# Altium schematic symbol library Diode%.SchLib: 376 symbols (part 3 of 9)
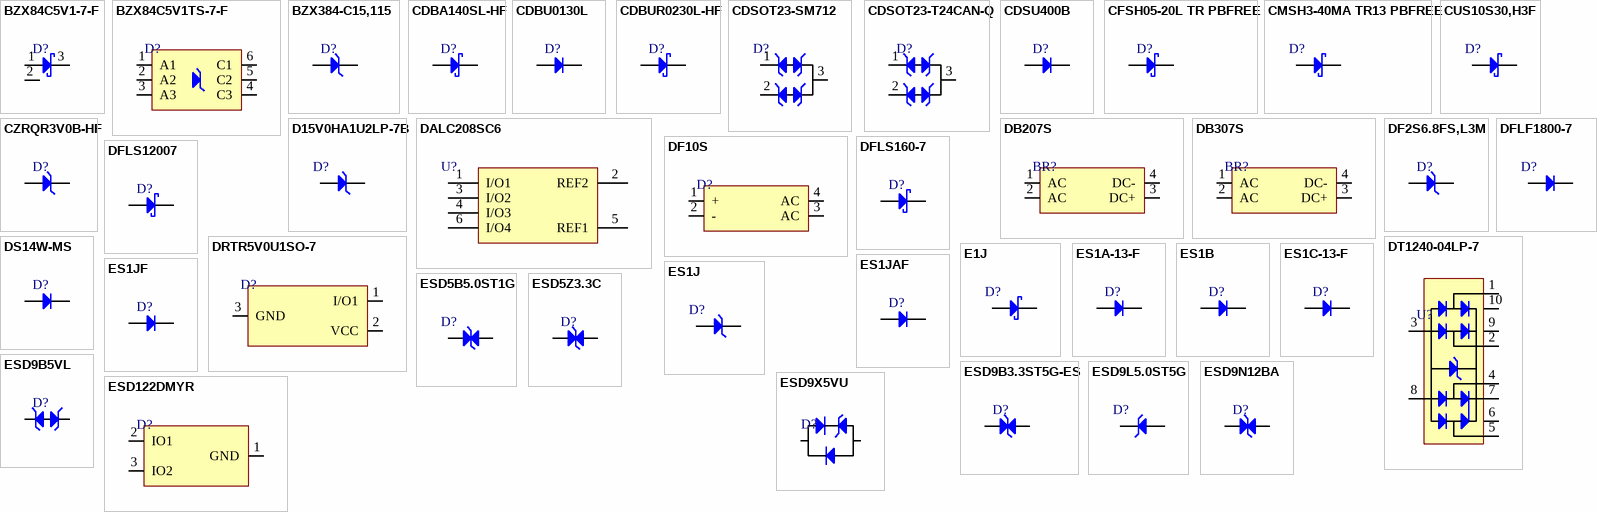
[diagram p11: symbols BZX84C5V1-7-F to ESD122DMYR]

## CDSOT23-T24CAN-Q
designator D?
TVS DIODE 24VWM 40VC SOT23-3; Manufacturer: Bourns; Manufacturer Part Number: CDSOT23-T24CAN-Q; Item Type: TVS Diodes; Supplier: Digikey; LCSC Part Number: C350941; RoHS: Yes; Stock: 17231; Pricing: 1=0.36, 10=0.282, 100=0.1691, 500=0.15656, 1000=0.10645, 3000=0.098, 6000=0.09393, 9000=0.08454, 30000=0.08328, 75000=0.07827 (USD); RoHS Compliant: 5897YesNo; ComponentLink1URL: http://www.farnell.com/datasheets/2372435.pdf?src-supplier=Farnell; ComponentLink1Description: http://www.farnell.com/datasheets/2372435.pdf?src-supplier=Farnell; ComponentLink2URL: https://www.bourns.com/docs/Product-Datasheets/cdsot23-t24can-Q.pdf?src-supplier=Digikey; ComponentLink2Description: https://www.bourns.com/docs/Product-Datasheets/cdsot23-t24can-Q.pdf?src-supplier=Digikey; ComponentLink3URL: http://www.farnell.com/datasheets/2372435.pdf?src-supplier=Newark; ComponentLink3Description: http://www.farnell.com/datasheets/2372435.pdf?src-supplier=Newark
footprint SOT-23 (TRANS NPN 40V 0.6A SOT23)
pins: 1, 2, 3

## CDSU400B
designator D?
DIODE STANDARD 80V 100MA 0603; Manufacturer: Comchip; Manufacturer Part Number: CDSU400B; Supplier: Digikey; LCSC Part Number: C2886041; RoHS: Yes; Item Type: Diode; Stock: 728591; Pricing: 1=0.13, 10=0.088, 100=0.054, 500=0.04476, 1000=0.04276, 2000=0.04223 (USD); ComponentLink1URL: https://datasheet.ciiva.com/4435/cdsu400b-revb370614-56727-4435278.pdf?src-supplier=Mouser; ComponentLink1Description: https://datasheet.ciiva.com/4435/cdsu400b-revb370614-56727-4435278.pdf?src-supplier=Mouser; ComponentLink2URL: https://datasheet.ciiva.com/911/cdsu400b-revb370614-911825.pdf?src-supplier=Digikey; ComponentLink2Description: https://datasheet.ciiva.com/911/cdsu400b-revb370614-911825.pdf?src-supplier=Digikey; ComponentLink3URL: https://datasheet.ciiva.com/911/cdsu400b-revb370614-911826.pdf?src-supplier=Digikey; ComponentLink3Description: https://datasheet.ciiva.com/911/cdsu400b-revb370614-911826.pdf?src-supplier=Digikey; ComponentLink4URL: https://datasheet.ciiva.com/911/cdsu400b-revb370614-911827.pdf?src-supplier=Digikey; ComponentLink4Description: https://datasheet.ciiva.com/911/cdsu400b-revb370614-911827.pdf?src-supplier=Digikey
footprint CDSU400B
pins: 1 A, 2 K

## CFSH05-20L TR PBFREE
designator D?
DIODE SCHOTTKY 20V 500MA SOD882; Manufacturer: Central Semiconductor; Manufacturer Part Number: CFSH05-20L TR PBFREE; Supplier: Digikey; Supplier Part Number: 1514-CFSH05-20LTRPBFREECT-ND; RoHS: Yes; Item Type: Diode; Pricing: 1=0.47, 10=0.374, 100=0.255, 500=0.17844, 1000=0.15369, 2000=0.14408 (USD); Mounting Technology: Surface Mount; Series: -; Average Rectified Current: 500mA; Max Reverse Voltage (DC): 20V; RoHS Compliant: Yes
footprint SOD-882
pins: 1 A, 2 K

## CMSH3-40MA TR13 PBFREE
designator D?
DIODE SCHOTTKY 40V 3A SMA; Manufacturer: Central Semiconductor; Manufacturer Part Number: CMSH3-40MA TR13 PBFREE; Supplier 1: Digi-Key; Stock 1: 27620; Pricing 1: 1=0.67, 10=0.592, 100=0.4536, 500=0.3586, 1000=0.28688, 2000=0.25999 (USD); RoHS Compliant: Yes; Supplier Part Number 1: 1514-CMSH3-40MATR13PBFREEDKR-ND
footprint SMA
pins: 1 K, 2 A

## CUS10S30,H3F
designator D?
Diode Schottky 30V 1A Surface Mount USC; Manufacturer: Toshiba; Manufacturer Part Number: CUS10S30,H3F; Max Reverse Current: 500uA; Peak Non-Repetitive Surge Current: 5A; Element Configuration: Single; Supplier 1: Avnet; RoHS: Yes; Category: Rectifier Diodes; Stock 1: 9000; Pricing 1: 3000=0.04896, 6000=0.04768, 12000=0.04544, 18000=0.04416, 24000=0.04320, 30000=0.04192, 300000=0.04096 (USD); Mount: Surface Mount; Case/Package: SOD; Number of Pins: 2; Contact Plating: Tin,Silver; Min Operating Temperature: -55°C; Max Operating Temperature: 125°C; Packaging: Cut Tape; Average Rectified Current: 1A; Max Reverse Voltage (DC): 30V; RoHS Compliant: No; ComponentLink1URL: https://toshiba.semicon-storage.com/info/docget.jsp?did=14077&prodName=CUS10S30&src-supplier=Digi-Key; ComponentLink1Description: https://toshiba.semicon-storage.com/info/docget.jsp?did=14077&prodName=CUS10S30&src-supplier=Digi-Key; ComponentLink2URL: http://toshiba.semicon-storage.com/info/docget.jsp?did=14077&prodName=CUS10S30&src-supplier=Avnet; ComponentLink2Description: http://toshiba.semicon-storage.com/info/docget.jsp?did=14077&prodName=CUS10S30&src-supplier=Avnet; ComponentLink3URL: http://toshiba.semicon-storage.com/info/lookup.jsp?pid=CUS10S30&amp;lang=en&src-supplier=Mouser; ComponentLink3Description: http://toshiba.semicon-storage.com/info/lookup.jsp?pid=CUS10S30&amp;lang=en&src-supplier=Mouser; Supplier Part Number 1: CUS10S30,H3F; LCSC Part Number: C146335
footprint SOD-323
pins: 1 K, 2 A

## CZRQR3V0B-HF
designator D?
DIODE ZENER 3V 125MW SOD923F; Manufacturer: Comchip; Manufacturer Part Number: CZRQR3V0B-HF; Item Type: Diodes; Tolerance: 2%; Impedance: 95R; Supplier: Digikey; RoHS: Yes; Stock: 15601; Pricing: 1=0.33 (USD); Mounting Technology: Surface Mount; Case/Package: 0402; Min Operating Temperature: -55°C; Max Operating Temperature: 125°C; Package Quantity: 5000; Packaging: Tape and Reel; Zener Voltage: 3V; Max Power Dissipation: 125mW; RoHS Compliant: Yes; ComponentLink1URL: https://datasheet.ciiva.com/2957/czrqr2v4b-hf-thru-czrqr39vb-hf-reva-2957735.pdf?src-supplier=Digikey; ComponentLink1Description: https://datasheet.ciiva.com/2957/czrqr2v4b-hf-thru-czrqr39vb-hf-reva-2957735.pdf?src-supplier=Digikey
footprint SOD-923F
pins: 1 A, 2 K

## D15V0HA1U2LP-7B
designator D?
TVS DIODE 15VWM 23VC DFN1006-2; Manufacturer: Diodes; Manufacturer Part Number: D15V0HA1U2LP-7B; Item Type: TVS Diodes; Supplier: Digikey; LCSC Part Number: C3702027; RoHS: Yes; Stock: 12938; Pricing: 1=0.3, 10=0.243, 25=0.2036, 100=0.129, 250=0.09956, 500=0.08484, 1000=0.05769, 2500=0.05204, 5000=0.04525 (USD)
footprint DFN1006-2L_
pins: 1 K, 2 A

## DALC208SC6
designator U?
TVS DIODE 5V SOT23-6; Manufacturer Part Number: DALC208SC6; Manufacturer: STMicroelectronics; Footprint: SOT-23-6; LCSC Part Number: C5123934; ComponentLink1Description: LCSC; ComponentLink1URL: https://www.lcsc.com/product-detail/MOSFETs_TECH-PUBLIC-DALC208SC6_C5123934.html
footprint SOT-23-6
pins: 1 I/O1, 2 REF2, 3 I/O2, 4 I/O3, 5 REF1, 6 I/O4

## DB207S
designator BR?
60A 1.1V@2A 2A 1kV DBS Bridge Rectifiers ROHS; Manufacturer: MDD; Manufacturer Part Number: DB207S; Package: DBS; LCSC Part Number: C29174; Item Type: Bridge Rectifier; ComponentLink1Description: LCSC; ComponentLink1URL: https://www.lcsc.com/product-detail/Bridge-Rectifiers_MDD-Microdiode-Electronics-DB207S_C29174.html
footprint DBS
pins: 1 AC, 2 AC, 3 DC+, 4 DC-

## DB307S
designator BR?
60A 1.1V@3A 3A 1kV DBS Bridge Rectifiers ROHS; Manufacturer: GOODWORK; Manufacturer Part Number: DB307S; Package: DBS; LCSC Part Number: C525744; Item Type: Bridge Rectifiers; ComponentLink1Description: LCSC; ComponentLink1URL: https://lcsc.com/product-detail/Bridge-Rectifiers_GOODWORK-DB307S_C525744.html?s_z=n_LMB8S-TP
footprint DBS
pins: 1 AC, 2 AC, 3 DC+, 4 DC-

## DF2S6.8FS,L3M
designator D?
TVS DIODE 5VWM 9VC SOD923; Manufacturer: Toshiba; Manufacturer Part Number: DF2S6.8FS,L3M; Item Type: TVS Diodes; Number of Unidirectional Channels: 1; Reverse Standoff Voltage: 5V; Min Breakdown Voltage: 6.4V; Power Line Protection: No; Peak Pulse Current: 1A; Diode Type: ZENER; Supplier: Digikey; LCSC Part Number: C1972978; RoHS: No; Stock: 487248; Pricing: 1=0.1, 10=0.068, 100=0.031, 500=0.0275, 1000=0.024, 2000=0.022, 5000=0.02 (USD); Mounting Technology: Surface Mount; Packaging: Cut Tape; Series: -; RoHS Compliant: No; ComponentLink1URL: http://www.mouser.com/ds/2/408/DF2S6.8FS_datasheet_en_20140709-708755.pdf?src-supplier=Mouser; ComponentLink1Description: http://www.mouser.com/ds/2/408/DF2S6.8FS_datasheet_en_20140709-708755.pdf?src-supplier=Mouser; ComponentLink2URL: https://toshiba.semicon-storage.com/info/docget.jsp?did=22219&prodName=DF2S6.8FS&src-supplier=Digikey; ComponentLink2Description: https://toshiba.semicon-storage.com/info/docget.jsp?did=22219&prodName=DF2S6.8FS&src-supplier=Digikey
footprint SOD-923.
pins: 1 K, 2 A

## DF10S
designator D?
50A 1.1V@1A 1A 1kV DBS Bridge Rectifiers ROHS; Manufacturer: MSKSEMI; Manufacturer Part Number: DF10S; Package: DBS; LCSC Part Number: C5174636; Item Type: Bridge Rectifier; ComponentLink1Description: LCSC; ComponentLink1URL: https://www.lcsc.com/product-detail/Bridge-Rectifiers_MSKSEMI-DF10S_C5174636.html
footprint DF10S
pins: 1 +, 2 -, 3 AC, 4 AC

## DFLF1800-7
designator D?
1.35V@1A 500ns 1A 800V Power-DI-123 Fast recovery/high efficiency diode ROHS; Manufacturer: Diodes Incorporated; Manufacturer Part number: DFLF1800-7; Package: Power-DI-123; LCSC Part Number: C460678; Item Type: Diode; ComponentLink1Description: LCSC; ComponentLink1URL: https://www.lcsc.com/product-detail/Fast-recovery-high-efficiency-diode_Diodes-Incorporated-DFLF1800-7_C460678.html
footprint PowerDI123
pins: 1 A, 2 K

## DFLS160-7
designator D?
DIODE SCHOTTKY 60V 1A PWRDI123; Manufacturer: Diodes; Manufacturer Part Number: DFLS160-7; Max Reverse Current: 100uA; Peak Non-Repetitive Surge Current: 50A; Forward Voltage: 500mV; Polarity: Standard; Value: 67pF; Supplier: Future Electronics; Supplier Part Number: 3129421; RoHS: Yes; Category: Rectifier Diodes; Stock: 33000; Pricing: 3000=0.103, 6000=0.1, 9000=0.0986, 12000=0.0975, 15000=0.0941 (USD); Mounting Technology: Surface Mount; Pins: 2; Min Operating Temperature: -65°C; Max Operating Temperature: 150°C; Forward Current: 1A; Max Repetitive Reverse Voltage (Vrrm): 60V; Packaging: Tape and Reel; Package Quantity: 3000; Average Rectified Current: 1A; Max Forward Surge Current (Ifsm): 50A; Termination: SMD/SMT; Voltage Rating (DC): 60V; Current Rating: 1A; Output Current: 1A; Max Reverse Voltage (DC): 60V; Series: -; Length: 2.8mm; Width: 1.78mm; Height: 0.98mm; Radiation Hardening: No; Reach SVHC Compliant: No; Lead Free: Lead Free; RoHS Compliant: Yes; ComponentLink1URL: https://datasheet.ciiva.com/8301/ds30548-8301937.pdf?src-supplier=Avnet; ComponentLink1Description: https://datasheet.ciiva.com/8301/ds30548-8301937.pdf?src-supplier=Avnet; ComponentLink2URL: https://datasheet.ciiva.com/4715/ds30548-86621-4715693.pdf?src-supplier=Mouser; ComponentLink2Description: https://datasheet.ciiva.com/4715/ds30548-86621-4715693.pdf?src-supplier=Mouser; ComponentLink3URL: https://datasheet.ciiva.com/16958/0900766b80e30da9-16958716.pdf?src-supplier=Allied+Electronics; ComponentLink3Description: https://datasheet.ciiva.com/16958/0900766b80e30da9-16958716.pdf?src-supplier=Allied+Electronics; ComponentLink4URL: https://datasheet.ciiva.com/22695/ds30548-22695808.pdf?src-supplier=Element14; ComponentLink4Description: https://datasheet.ciiva.com/22695/ds30548-22695808.pdf?src-supplier=Element14; ComponentLink5URL: https://datasheet.ciiva.com/16199/ds30548-16199750.pdf?src-supplier=Future+Electronics; ComponentLink5Description: https://datasheet.ciiva.com/16199/ds30548-16199750.pdf?src-supplier=Future+Electronics; ComponentLink6URL: https://datasheet.ciiva.com/914/ds30548-914331.pdf?src-supplier=Digikey; ComponentLink6Description: https://datasheet.ciiva.com/914/ds30548-914331.pdf?src-supplier=Digikey; ComponentLink7URL: https://datasheet.ciiva.com/914/ds30548-914332.pdf?src-supplier=Digikey; ComponentLink7Description: https://datasheet.ciiva.com/914/ds30548-914332.pdf?src-supplier=Digikey; ComponentLink8URL: https://datasheet.ciiva.com/914/ds30548-914333.pdf?src-supplier=Digikey; ComponentLink8Description: https://datasheet.ciiva.com/914/ds30548-914333.pdf?src-supplier=Digikey; ComponentLink9URL: https://datasheet.ciiva.com/7964/ds30548-7964253.pdf?src-supplier=Element14; ComponentLink9Description: https://datasheet.ciiva.com/7964/ds30548-7964253.pdf?src-supplier=Element14; Item Type: Diode
footprint PowerDI123
pins: 1 A, 2 K

## DFLS12007
designator D?
DIODE SCHOTTK 200V 1A POWERDI123; Manufacturer: Diodes; Manufacturer Part Number: DFLS12007; Forward Voltage: 850mV; Max Reverse Current: 2uA; Peak Non-Repetitive Surge Current: 40A; Element Configuration: Single; Polarity: Standard; Value: 23pF; Supplier: Arrow Electronics; LCSC Part Number: C324985; RoHS: Yes; Item Type: Diode; Stock: 93936; Pricing: 734=0.2416, 3000=0.2002, 6000=0.1958 (USD); Mounting Technology: Surface Mount; Pins: 123; Contact Plating: Tin,Matte; Weight: 1.058219oz; Min Operating Temperature: -65°C; Max Operating Temperature: 150°C; Packaging: Cut Tape; Forward Current: 1A; Package Quantity: 3000; Average Rectified Current: 1A; Max Repetitive Reverse Voltage (Vrrm): 200V; Max Forward Surge Current (Ifsm): 40A; Termination: SMD/SMT; Voltage Rating (DC): 200V; Current Rating: 1A; Output Current: 1A; Max Reverse Voltage (DC): 200V; Series: DFLS1200; Length: 2.8mm; Width: 1.78mm; Height: 0.98mm; Radiation Hardening: No; Reach SVHC Compliant: Yes; Lead Free: Lead Free; ComponentLink1URL: https://datasheet.ciiva.com/4715/ds30628-48014-4715817.pdf?src-supplier=Mouser; ComponentLink1Description: https://datasheet.ciiva.com/4715/ds30628-48014-4715817.pdf?src-supplier=Mouser; ComponentLink2URL: https://datasheet.ciiva.com/8301/ds30628-8301755.pdf?src-supplier=Avnet; ComponentLink2Description: https://datasheet.ciiva.com/8301/ds30628-8301755.pdf?src-supplier=Avnet; ComponentLink3URL: https://datasheet.ciiva.com/16564/ds30628-16564006.pdf?; ComponentLink3Description: https://datasheet.ciiva.com/16564/ds30628-16564006.pdf?; ComponentLink4URL: https://datasheet.ciiva.com/914/ds30628-914669.pdf?src-supplier=Digikey; ComponentLink4Description: https://datasheet.ciiva.com/914/ds30628-914669.pdf?src-supplier=Digikey; ComponentLink5URL: https://datasheet.ciiva.com/914/ds30628-914670.pdf?src-supplier=Digikey; ComponentLink5Description: https://datasheet.ciiva.com/914/ds30628-914670.pdf?src-supplier=Digikey; ComponentLink6URL: https://datasheet.ciiva.com/914/ds30628-914671.pdf?src-supplier=Digikey; ComponentLink6Description: https://datasheet.ciiva.com/914/ds30628-914671.pdf?src-supplier=Digikey; ComponentLink7URL: https://datasheet.ciiva.com/22695/378369-22695804.pdf?src-supplier=Element14; ComponentLink7Description: https://datasheet.ciiva.com/22695/378369-22695804.pdf?src-supplier=Element14
footprint PowerDI123
pins: 1 A, 2 K

## DRTR5V0U1SO-7
designator D?
TVS DIODE 5.5VWM SOT23; Manufacturer: Diodes; Manufacturer Part Number: DRTR5V0U1SO-7; Item Type: (TVS/ESD); Supplier: Digikey; Supplier Part Number: DRTR5V0U1SO-7DICT-ND; RoHS: Yes; Category: TVS Diodes; Stock: 83982; Pricing: 1=0.34, 10=0.238, 100=0.1201, 500=0.098, 1000=0.07271 (USD); ComponentLink1URL: http://www.farnell.com/datasheets/2814436.pdf?src-supplier=Farnell; ComponentLink1Description: http://www.farnell.com/datasheets/2814436.pdf?src-supplier=Farnell; ComponentLink2URL: http://www.mouser.com/ds/2/115/DRTR5V0U1SO-271637.pdf?src-supplier=Mouser; ComponentLink2Description: http://www.mouser.com/ds/2/115/DRTR5V0U1SO-271637.pdf?src-supplier=Mouser; ComponentLink3URL: http://www.diodes.com/datasheets/DRTR5V0U1SO.pdf?src-supplier=Avnet; ComponentLink3Description: http://www.diodes.com/datasheets/DRTR5V0U1SO.pdf?src-supplier=Avnet; LCSC Part Number: C1973123
footprint SOT-23 (TRANS NPN 40V 0.6A SOT23)
pins: 1 I/O1, 2 VCC, 3 GND

## DS14W-MS
designator D?
Independent Type 1A 40V 550mV@1A SOD-123FL Diodes - General Purpose ROHS; Manufacturer: MSKSEMI; Manufacturer Part Number: DS14W-MS; Item Type: Diode; Package: SOD-123FL; LCSC Part Number: C5120758; ComponentLink1Description: LCSC; ComponentLink1URL: https://www.lcsc.com/product-detail/Diodes-General-Purpose_MSKSEMI-DS14W-MS_C5120758.html
footprint SOD-123FL
pins: 1 K, 2 A

## DT1240-04LP-7
designator U?
TVS DIODE 5.5VWM 11VC U-DFN2510; Manufacturer: Diodes; Manufacturer Part Number: DT1240-04LP-7; Item Type: TVS Diodes; Supplier: Digi-Key; Supplier Part Number: DT1240-04LP-7DICT-ND; RoHS: Yes; Stock: 985; Pricing: 1=0.46, 10=0.319, 100=0.1612, 500=0.1315, 1000=0.09757 (USD); ComponentLink1URL: https://datasheet.ciiva.com/29574/dt1240-04lp-29574117.pdf?src-supplier=Digi-Key; ComponentLink1Description: https://datasheet.ciiva.com/29574/dt1240-04lp-29574117.pdf?src-supplier=Digi-Key; ComponentLink2URL: https://datasheet.ciiva.com/48480/dt1240-04lp-48480037.pdf?src-supplier=Avnet; ComponentLink2Description: https://datasheet.ciiva.com/48480/dt1240-04lp-48480037.pdf?src-supplier=Avnet; ComponentLink3URL: https://datasheet.ciiva.com/29574/dt1240-04lp-29574118.pdf?src-supplier=Digi-Key; ComponentLink3Description: https://datasheet.ciiva.com/29574/dt1240-04lp-29574118.pdf?src-supplier=Digi-Key; ComponentLink4URL: https://datasheet.ciiva.com/29574/dt1240-04lp-29574119.pdf?src-supplier=Digi-Key; ComponentLink4Description: https://datasheet.ciiva.com/29574/dt1240-04lp-29574119.pdf?src-supplier=Digi-Key; LCSC Part Number: C444992
footprint U-DFN2510-10
pins: 1, 2, 3, 4, 5, 6, 7, 8, 9, 10

## E1J
designator D?
SOD-123FL Diodes - Fast Recovery Rectifiers ROHS; Manufacturer: XCH; Manufacturer Part Number: E1J; Item Type: Diode; Package: SOD-123FL; JLCPCB Part Number: C5354022; ComponentLink1Description: JLCPCB; ComponentLink1URL: https://jlcpcb.com/partdetail/Xch-E1J/C5354022
footprint SOD-123FL
pins: 1 K, 2 A

## ES1A-13-F
designator D?
DIODE GEN PURP 50V 1A SMA; Manufacturer: Diodes; Manufacturer Part Number: ES1A-13-F; Supplier: Digikey; LCSC Part Number: C674398; RoHS: Yes; Item Type: Diodes; Stock: 130862; Pricing: 1=0.47, 10=0.336, 100=0.1693, 500=0.15004, 1000=0.11676, 2000=0.1045 (USD); ComponentLink1URL: https://datasheet.ciiva.com/27052/1540279-27052395.pdf?src-supplier=Jameco; ComponentLink1Description: https://datasheet.ciiva.com/27052/1540279-27052395.pdf?src-supplier=Jameco; ComponentLink2URL: https://datasheet.ciiva.com/7964/ds14001-7964264.pdf?src-supplier=Element14; ComponentLink2Description: https://datasheet.ciiva.com/7964/ds14001-7964264.pdf?src-supplier=Element14; ComponentLink3URL: https://datasheet.ciiva.com/913/ds14001-913221.pdf?src-supplier=Digikey; ComponentLink3Description: https://datasheet.ciiva.com/913/ds14001-913221.pdf?src-supplier=Digikey; ComponentLink4URL: https://datasheet.ciiva.com/913/ds14001-913222.pdf?src-supplier=Digikey; ComponentLink4Description: https://datasheet.ciiva.com/913/ds14001-913222.pdf?src-supplier=Digikey; ComponentLink5URL: https://datasheet.ciiva.com/913/ds14001-913223.pdf?src-supplier=Digikey; ComponentLink5Description: https://datasheet.ciiva.com/913/ds14001-913223.pdf?src-supplier=Digikey; ComponentLink6URL: https://datasheet.ciiva.com/15144/getdatasheetpartid-89769-15144650.pdf?src-supplier=Verical; ComponentLink6Description: https://datasheet.ciiva.com/15144/getdatasheetpartid-89769-15144650.pdf?src-supplier=Verical
footprint SMA
pins: 1 K, 2 A

## ES1B
designator D?
DIODE STANDARD 100V 1A DO214AC; Manufacturer: ON Semiconductor / Fairchild; Manufacturer Part Number: ES1B; Item Type: Diodes; Supplier: Arrow Electronics; LCSC Part Number: C232818; RoHS: Yes; Stock: 142500; Pricing: 7500=0.0732, 22500=0.0629 (USD); ComponentLink1URL: https://datasheet.ciiva.com/13095/es1b-187537-13095611.pdf?src-supplier=Mouser; ComponentLink1Description: https://datasheet.ciiva.com/13095/es1b-187537-13095611.pdf?src-supplier=Mouser; ComponentLink2URL: https://datasheet.ciiva.com/918/es1a-918414.pdf?src-supplier=Digikey; ComponentLink2Description: https://datasheet.ciiva.com/918/es1a-918414.pdf?src-supplier=Digikey; ComponentLink3URL: https://datasheet.ciiva.com/918/es1a-918415.pdf?src-supplier=Digikey; ComponentLink3Description: https://datasheet.ciiva.com/918/es1a-918415.pdf?src-supplier=Digikey; ComponentLink4URL: https://datasheet.ciiva.com/918/es1a-918416.pdf?src-supplier=Digikey; ComponentLink4Description: https://datasheet.ciiva.com/918/es1a-918416.pdf?src-supplier=Digikey; ComponentLink5URL: https://datasheet.ciiva.com/28468/575529-28468958.pdf?src-supplier=Element14; ComponentLink5Description: https://datasheet.ciiva.com/28468/575529-28468958.pdf?src-supplier=Element14; ComponentLink6URL: https://datasheet.ciiva.com/7965/575529-7965132.pdf?src-supplier=Element14; ComponentLink6Description: https://datasheet.ciiva.com/7965/575529-7965132.pdf?src-supplier=Element14
footprint SMA(DO-214AC)
pins: 1 K, 2 A

## ES1C-13-F
designator D?
DIODE STANDARD 150V 1A SMA; Manufacturer: Diodes; Manufacturer Part Number: ES1C-13-F; Max Reverse Current: 5uA; Reverse Recovery Time: 25ns; Peak Non-Repetitive Surge Current: 30A; Forward Voltage: 920mV; Value: 10pF; Supplier: Arrow Electronics; LCSC Part Number: C781252; RoHS: Yes; Item Type: Diodes; Stock: 614; Pricing: 614=0.1548 (USD); Mounting Technology: Surface Mount; Case/Package: SMA; Pins: 2; Weight: 0.002258oz; Min Operating Temperature: -55°C; Max Operating Temperature: 150°C; Forward Current: 1A; Max Repetitive Reverse Voltage (Vrrm): 150V; Package Quantity: 5000; Packaging: Tape and Reel; Max Surge Current: 30A; Recovery Time: 25ns; Reverse Voltage (DC): 150V; Average Rectified Current: 1A; Termination: SMD/SMT; Polarity: Standard; Voltage Rating (DC): 150V; Current Rating: 1A; Output Current: 1A; Max Reverse Voltage (DC): 150V; Series: -; Reverse Recovery Time-Max: 25ns; Length: 4.6mm; Width: 2.92mm; Height: 2.1mm; Radiation Hardening: No; Lead Free: Lead Free; RoHS Compliant: Yes; ComponentLink1URL: https://datasheet.ciiva.com/914/ds14001-914688.pdf?src-supplier=Digikey; ComponentLink1Description: https://datasheet.ciiva.com/914/ds14001-914688.pdf?src-supplier=Digikey; ComponentLink2URL: https://datasheet.ciiva.com/8301/ds14001-8301646.pdf?src-supplier=Avnet; ComponentLink2Description: https://datasheet.ciiva.com/8301/ds14001-8301646.pdf?src-supplier=Avnet; ComponentLink3URL: https://datasheet.ciiva.com/914/ds14001-914689.pdf?src-supplier=Digikey; ComponentLink3Description: https://datasheet.ciiva.com/914/ds14001-914689.pdf?src-supplier=Digikey
footprint SMA
pins: 1 K, 2 A

## ES1J
designator D?
1.7V@1A 35ns Single 1A 600V SMA Diodes - Fast Recovery Rectifiers ROHS; Manufacturer: MDD; Manufacturer Part Number: ES1J; Item Type: Diode; Package: SMA; LCSC Part Number: C412438; ComponentLink1Description: LCSC; ComponentLink1URL: https://www.lcsc.com/product-detail/Diodes-Fast-Recovery-Rectifiers_MDD-Microdiode-Electronics-ES1J_C412438.html
footprint SMA
pins: 1 K, 2 A

## ES1JAF
designator D?
DIODE GEN PURP 600V 1A DO214AD; Manufacturer: ON Semiconductor / Fairchild; Manufacturer Part Number: ES1JAF; Value: 15pF; Max Reverse Current: 1uA; Supplier: Digikey; LCSC Part Number: C896698; RoHS: Yes; Item Type: Diode; Stock: 35994; Pricing: 1=0.66, 10=0.443, 100=0.3026, 500=0.23836, 1000=0.21716, 2000=0.19913, 5000=0.17939 (USD); Forward Current: 1A; Reverse Voltage: 600V; Height: 1.1mm; ComponentLink1URL: http://www.farnell.com/datasheets/2572314.pdf?src-supplier=Farnell; ComponentLink1Description: http://www.farnell.com/datasheets/2572314.pdf?src-supplier=Farnell; ComponentLink2URL: http://www.farnell.com/datasheets/2572314.pdf?src-supplier=Newark; ComponentLink2Description: http://www.farnell.com/datasheets/2572314.pdf?src-supplier=Newark; ComponentLink3URL: http://www.farnell.com/datasheets/2572314.pdf?src-supplier=Element14; ComponentLink3Description: http://www.farnell.com/datasheets/2572314.pdf?src-supplier=Element14; ComponentLink4URL: https://www.onsemi.com/pub/Collateral/ES1JAF-D.PDF?src-supplier=Digikey; ComponentLink4Description: https://www.onsemi.com/pub/Collateral/ES1JAF-D.PDF?src-supplier=Digikey; ComponentLink5URL: https://www.fairchildsemi.com/datasheets/ES/ES1DAF.pdf?src-supplier=Digikey; ComponentLink5Description: https://www.fairchildsemi.com/datasheets/ES/ES1DAF.pdf?src-supplier=Digikey
footprint DO-214AD (SMAF)
pins: 1 K, 2 A

## ES1JF
designator D?
1.65V@1A 35ns Independent Type 1A 600V DO-214AD Fast Recovery / High Efficiency Diodes ROHS; Manufacturer: Foshan Blue Rocket Elec; Manufacturer Part Number: ES1JF; Item Type: Diode; Package: DO-214AD; LCSC Part Number: C328590; ComponentLink1Description: LCSC; ComponentLink1URL: https://www.lcsc.com/product-detail/Fast-recovery-high-efficiency-diode_Foshan-Blue-Rocket-Elec-ES1JF_C328590.html
footprint DO-214AD
pins: 1 K, 2 A

## ESD5B5.0ST1G
designator D?
TVS DIODE 5VWM SOD523; Manufacturer: ON Semiconductor; Manufacturer Part Number: ESD5B5.0ST1G; Item Type: ESD Protection Device; Supplier: Future Electronics; Supplier Part Number: 1159725; RoHS: Yes; Category: ESD and Circuit Protection ICs; Stock: 486000; Pricing: 3000=0.0396, 9000=0.0381, 15000=0.0375, 60000=0.0357, 90000=0.0346 (USD); ComponentLink1URL: https://datasheet.ciiva.com/339/esd5b5-0st1g-339772.pdf?src-supplier=Avnet; ComponentLink1Description: https://datasheet.ciiva.com/339/esd5b5-0st1g-339772.pdf?src-supplier=Avnet; ComponentLink2URL: https://datasheet.ciiva.com/339/esd5b5-0st1g-339772.pdf?src-supplier=Digi-Key; ComponentLink2Description: https://datasheet.ciiva.com/339/esd5b5-0st1g-339772.pdf?src-supplier=Digi-Key; ComponentLink3URL: https://datasheet.ciiva.com/22637/716649-22637178.pdf?src-supplier=Element14; ComponentLink3Description: https://datasheet.ciiva.com/22637/716649-22637178.pdf?src-supplier=Element14; ComponentLink4URL: https://datasheet.ciiva.com/4510/esd5b5-0st1g-241623-4510548.pdf?src-supplier=Mouser; ComponentLink4Description: https://datasheet.ciiva.com/4510/esd5b5-0st1g-241623-4510548.pdf?src-supplier=Mouser; ComponentLink5URL: https://datasheet.ciiva.com/339/esd5b5-0st1-d-339773.pdf?src-supplier=Digi-Key; ComponentLink5Description: https://datasheet.ciiva.com/339/esd5b5-0st1-d-339773.pdf?src-supplier=Digi-Key; ComponentLink6URL: https://datasheet.ciiva.com/339/esd5b5-0st1-d-339774.pdf?src-supplier=Digi-Key; ComponentLink6Description: https://datasheet.ciiva.com/339/esd5b5-0st1-d-339774.pdf?src-supplier=Digi-Key; LCSC Part Number: C93623
footprint SOD-523 (Bi-Directional)
pins: 1 A, 2 A

## ESD5Z3.3C
designator D?
5A 60W 12V 3.6V 3.3V SOD-523 ESD and Surge Protection (TVS/ESD) ROHS; Manufacturer: MDD(Microdiode Semiconductor); Manufacturer Part Number: ESD5Z3.3C; Package: SOD-523; LCSC Part Number: C502551; Item Type: (TVS/ESD); ComponentLink1Description: LCSC; ComponentLink1URL: https://www.lcsc.com/product-detail/ESD-and-Surge-Protection-TVS-ESD_MDD-Microdiode-Semiconductor-ESD5Z3-3C_C502551.html
footprint SOD-523 (Bi-Directional)
pins: 1 A, 2 A

## ESD9B3.3ST5G-ES
designator D?
6A 80W 10V 3.7V Bidirectional 3.3V SOD-923 ESD and Surge Protection (TVS/ESD) ROHS; Manufacturer: ElecSuper; Manufacturer Part Number: ESD9B3.3ST5G-ES; Item Type: Diode; Package: SOD-923; LCSC Part Number: C5180230; ComponentLink1Description: LCSC; ComponentLink1URL: https://www.lcsc.com/product-detail/ESD-and-Surge-Protection-TVS-ESD_ElecSuper-ESD9B3-3ST5G-ES_C5180230.html?s_z=n_C5180230
footprint SOD-923.
pins: 1 A, 2 A

## ESD9B5VL
designator D?
3A 35W 12V 5.6V Bidirectional 5V DFN1006 ESD and Surge Protection (TVS/ESD) ROHS; Manufacturer: TECH PUBLIC; Manufacturer Part Number: ESD9B5VL; Package: DFN1006; LCSC Part Number: C2827544; Item Type: (TVS/ESD); ComponentLink1Description: LCSC; ComponentLink1URL: https://www.lcsc.com/product-detail/ESD-and-Surge-Protection-TVS-ESD_TECH-PUBLIC-ESD9B5VL_C2827544.html?s_z=n_ESD9B5VL
footprint DFN1006-2L (Bi-Directional)
pins: 1 K, 2 K

## ESD9L5.0ST5G
designator D?
TVS DIODE 5V 9.8V SOD923; Manufacturer: ON Semiconductor; Manufacturer Part Number: ESD9L5.0ST5G; Capacitance: 0.9pF; Direction: Unidirectional; Number of Unidirectional Channels: 1; Min Breakdown Voltage: 5.4V; Power Line Protection: No; Leakage Current: 1uA; Element Configuration: Single; Peak Pulse Current: 1A; Diode Type: ZENER; Reverse Breakdown Voltage: 5.8V; Peak Pulse Power: 150mW; ESD Protection: Yes; Test Current: 1mA; Supplier 1: Digi-Key; RoHS: Yes; Category: ESD and Circuit Protection ICs; Stock 1: 558996; Pricing 1: 1=0.37000, 10=0.25600, 100=0.12500, 500=0.10426, 1000=0.07244, 2000=0.06278 (USD); Case/Package: SOD-923-2; Number of Pins: 2; Contact Plating: Tin,Matte; Min Operating Temperature: -55°C; Max Operating Temperature: 150°C; Package Quantity: 1; Packaging: Tape and Reel; Clamping Voltage: 9.8V; Reverse Standoff Voltage: 5V; Working Voltage: 5V; Resistor Type: Zener; Series: Automotive, AEC-Q101; Number of Elements: 1; Operating Supply Voltage: 5V; Max Surge Current: 1A; Breakdown Voltage: 5.4V; Number of Channels: 1; Polarity: Unidirectional; Termination: SMD/SMT; Max Reverse Leakage Current: 1uA; Max Breakdown Voltage: 5.4V; Number of Lines: 1; Power Dissipation: 150mW; Clamping Voltage-Max: 9.8V; Length: 0.8mm; Width: 0.65mm; Height: 0.4mm; Depth: 0.6mm; Radiation Hardening: No; Lead Free: Lead Free; RoHS Compliant: Yes; REACH SVHC: No SVHC; Halogen Free: Halogen Free; ComponentLink1URL: https://datasheet.ciiva.com/15143/getdatasheetpartid-185186-15143896.pdf?src-supplier=Verical; ComponentLink1Description: https://datasheet.ciiva.com/15143/getdatasheetpartid-185186-15143896.pdf?src-supplier=Verical; ComponentLink2URL: https://datasheet.ciiva.com/4510/esd9l-d-4510647.pdf?src-supplier=Mouser; ComponentLink2Description: https://datasheet.ciiva.com/4510/esd9l-d-4510647.pdf?src-supplier=Mouser; ComponentLink3URL: https://datasheet.ciiva.com/3304/esd9l-d-3304011.pdf?src-supplier=Avnet; ComponentLink3Description: https://datasheet.ciiva.com/3304/esd9l-d-3304011.pdf?src-supplier=Avnet; ComponentLink4URL: https://datasheet.ciiva.com/16437/esd9l-d-16437835.pdf?src-supplier=Future+Electronics; ComponentLink4Description: https://datasheet.ciiva.com/16437/esd9l-d-16437835.pdf?src-supplier=Future+Electronics; ComponentLink5URL: https://datasheet.ciiva.com/339/esd9l-d-339853.pdf?src-supplier=Digi-Key; ComponentLink5Description: https://datasheet.ciiva.com/339/esd9l-d-339853.pdf?src-supplier=Digi-Key; ComponentLink6URL: https://datasheet.ciiva.com/339/esd9l-d-339854.pdf?src-supplier=Digi-Key; ComponentLink6Description: https://datasheet.ciiva.com/339/esd9l-d-339854.pdf?src-supplier=Digi-Key; ComponentLink7URL: https://datasheet.ciiva.com/11195/esd9l-d-11195342.pdf?src-supplier=Avnet; ComponentLink7Description: https://datasheet.ciiva.com/11195/esd9l-d-11195342.pdf?src-supplier=Avnet; ComponentLink8URL: https://datasheet.ciiva.com/25958/esd9l-d-25958446.pdf?src-supplier=Avnet+Europe; ComponentLink8Description: https://datasheet.ciiva.com/25958/esd9l-d-25958446.pdf?src-supplier=Avnet+Europe; ComponentLink9URL: https://datasheet.ciiva.com/339/esd9l-d-339855.pdf?src-supplier=Digi-Key; ComponentLink9Description: https://datasheet.ciiva.com/339/esd9l-d-339855.pdf?src-supplier=Digi-Key; Supplier Part Number 1: ESD9L5.0ST5GOSCT-ND; LCSC Part Number: C82326
footprint SOD-923.
pins: 1 K, 2 A

## ESD9N12BA
designator D?
X1-DFN1006-2 ESD and Surge Protection (TVS/ESD) ROHS; Manufacturer: TECH PUBLIC; Manufacturer Part Number: ESD9N12BA; Package: X1-DFN1006-2; LCSC Part Number: C2835445; Item Type: (TVS/ESD); ComponentLink1Description: LCSC; ComponentLink1URL: https://www.lcsc.com/product-detail/span-style-background-color-ff0-ESD-span-and-Surge-Protection-TVS-span-style-background-color-ff0-ESD-span_TECH-PUBLIC-ESD9N12BA_C2835445.html
footprint DFN1006-2L (Bi-Directional)
pins: 1 A, 2 A

## ESD9X5VU
designator D?
DFN1006-2 ESD Protection Devices ROHS; Manufacturer: TECH PUBLIC; Manufacturer Part Number: ESD9X5VU; Footprint: DFN1006-2; ComponentLink1Description: LCSC; ComponentLink1URL: https://www.lcsc.com/product-detail/span-style-background-color-ff0-ESD-span-Protection-Devices_TECH-PUBLIC-ESD9X5VU_C2875160.html; LCSC Part Number: C2875160
footprint DFN1006-2L_
pins: 1 K, 2 A

## ESD122DMYR
designator D?
TVS DIODE 3.6VWM 8.4VC 3X2SON; Manufacturer: Texas Instruments; Manufacturer Part Number: ESD122DMYR; Interface: USB,GPIO,HDMI,PCIe,SATA; Number of Channels: 2; Reverse Standoff Voltage: 3.6V; Min Breakdown Voltage: 5.1V; Peak Pulse Current: 2.5A; Peak Pulse Power: 20W; Power Line Protection: No; Diode Type: ZENER; Item Type: TVS/ESD; Supplier: Mouser; Supplier Part Number: 595-ESD122DMYR; RoHS: Yes; Category: Integrated Circuits (ICs); Stock: 137267; Pricing: 1=0.38, 10=0.33, 50=0.33, 100=0.252, 1000=0.172, 10000=0.152 (USD); Mounting Technology: Surface Mount; Pins: 3; Min Operating Temperature: -40°C; Max Operating Temperature: 125°C; Packaging: Cut Tape; Number of Bidirectional Channels: 2; Series: -; RoHS Compliant: Yes; ComponentLink1URL: http://www.ti.com/general/docs/lit/getliterature.tsp?genericPartNumber=ESD122&fileType=pdf&src-supplier=Farnell; ComponentLink1Description: http://www.ti.com/general/docs/lit/getliterature.tsp?genericPartNumber=ESD122&fileType=pdf&src-supplier=Farnell; ComponentLink2URL: http://www.ti.com/lit/ds/symlink/esd122.pdf?src-supplier=Digikey; ComponentLink2Description: http://www.ti.com/lit/ds/symlink/esd122.pdf?src-supplier=Digikey; ComponentLink3URL: http://www.ti.com/general/docs/suppproductinfo.tsp?distId=10&amp;gotoUrl=http%3A%2F%2Fwww.ti.com%2Flit%2Fgpn%2Fesd122&src-supplier=Digikey; ComponentLink3Description: http://www.ti.com/general/docs/suppproductinfo.tsp?distId=10&amp;gotoUrl=http%3A%2F%2Fwww.ti.com%2Flit%2Fgpn%2Fesd122&src-supplier=Digikey; LCSC Part Number: C1975871
footprint X2-SON-3(0.6x1.3).
pins: 1 GND, 2 IO1, 3 IO2

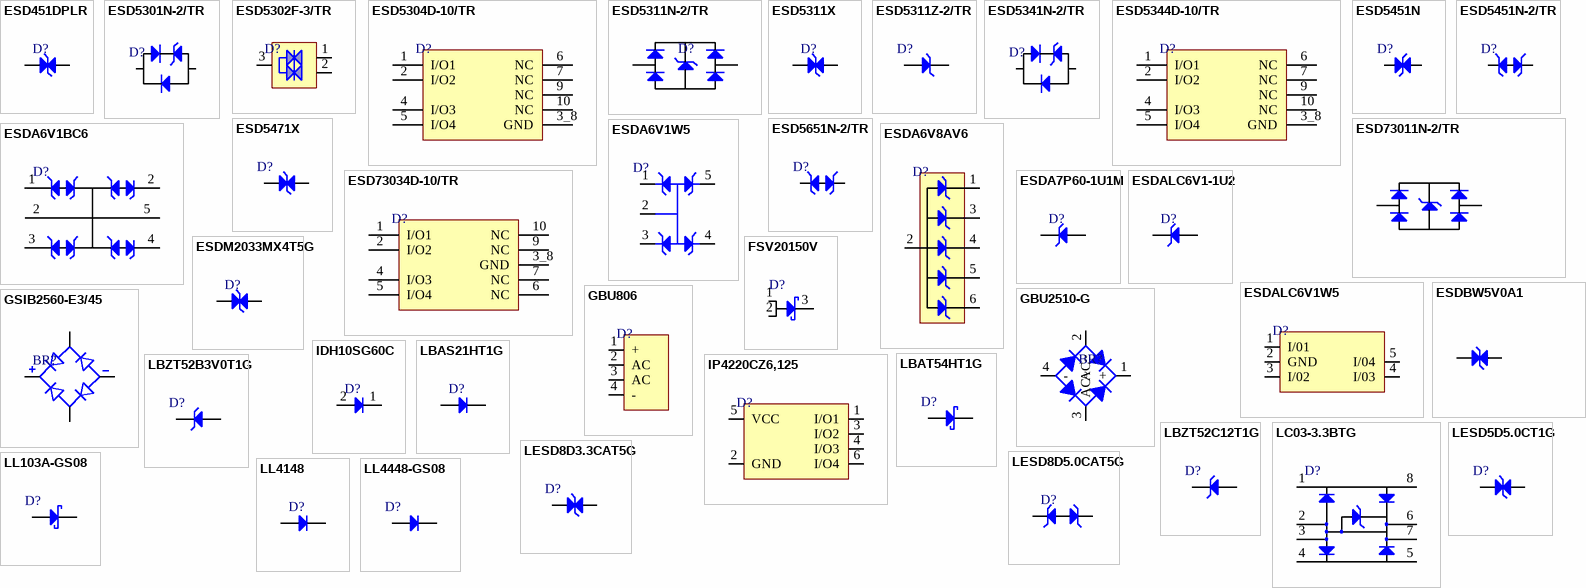
[diagram p3: symbols ESD451DPLR to LL4448-GS08]

## ESD451DPLR
designator D?
TVS DIODE 5.5VWM 9.5VC 2X2SON; Manufacturer: Texas Instruments; Manufacturer Part Number: ESD451DPLR; Supplier: Mouser; LCSC Part Number: C22427500; RoHS: No; Item Type: Diode; Pricing: 1=0.2, 10=0.192, 50=0.192, 100=0.164, 1000=0.147, 10000=0.068 (USD); Pins: 2; Length: 600um; Width: 300um; Height: 320um; Thickness: 300um
footprint X2SON-2(0.3x0.6)
pins: 1 A, 2 A

## ESD5301N-2/TR
designator D?
DFN1006 ESD Protection Devices ROHS; Manufacturer: WILLSEMI; Manufacturer Part Number: ESD5301N-2/TR; Item Type: Diode; Package: DFN1006; LCSC Part Number: C239829; ComponentLink1Description: LCSC; ComponentLink1URL: https://www.lcsc.com/product-detail/ESD-Protection-Devices_WILLSEMI-Will-Semicon-ESD5301N-2-TR_C239829.html
footprint DFN1006-2L_
pins: 1 K, 2 A

## ESD5302F-3/TR
designator D?
16A 20V 7V 5V@Max Unidirectional SOT-23 TVS ROHS; Manufacturer: WILLSEMI; Manufacturer Part Number: ESD5302F-3/TR; Item Type: Diode; Package: SOT-23; LCSC Part Number: C239643; ComponentLink1Description: LCSC; ComponentLink1URL: https://www.lcsc.com/product-detail/TVS_WILLSEMI-Will-Semicon-ESD5302F-3-TR_C239643.html
footprint Sot-23 (TRANS NPN 40V 0.6A SOT23)
pins: 1 I/O1, 2 I/O2, 3 GND

## ESD5304D-10/TR
designator D?
4A@8/20us 12V 7V 5V Unidirectional DFN2510-10L TVS ROHS; Manufacturer Part Number: ESD5304D-10/TR; Manufacturer: WILLSEMI; Item Type: Diode; Package: DFN2510-10L; LCSC Part Number: C153722; ComponentLink1Description: LCSC; ComponentLink1URL: https://www.lcsc.com/product-detail/TVS_WILLSEMI-Will-Semicon-ESD5304D-10-TR_C153722.html
footprint DFN2510-10L_
pins: 1 I/O1, 2 I/O2, 3_8 GND, 4 I/O3, 5 I/O4, 6 NC, 7 NC, 9 NC, 10 NC

## ESD5311N-2/TR
designator D?
4A@8/20us 21V 7.5V 5V@Max Bi-Directional X1-DFN1006-2 TVS ROHS; Manufacturer: WILLSEMI; Manufacturer Part Number: ESD5311N-2/TR; Item Type: Diode; Package: X1-DFN1006-2; LCSC Part Number: C153721; ComponentLink1Description: LCSC; ComponentLink1URL: https://www.lcsc.com/product-detail/TVS_WILLSEMI-Will-Semicon-ESD5311N-2-TR_C153721.html
footprint DFN1006-2L_
pins: 1 A, 2 A

## ESD5311X
designator D?
DFN1006-2 Electrostatic and Surge Protection (TVS/ESD) ROHS; Manufacturer: TECH PUBLIC; Manufacturer Part Number: ESD5311X; Item Type: Diode; Package: DFN1006-2; LCSC Part Number: C2844730; ComponentLink1Description: LCSC; ComponentLink1URL: https://www.lcsc.com/product-detail/Electrostatic-and-Surge-Protection-TVS-span-style-background-color-ff0-ESD-span_TECH-PUBLIC-ESD5311X_C2844730.html
footprint DFN1006-2L_
pins: 1 A, 2 A

## ESD5311Z-2/TR
designator D?
DFN0603-D ESD Protection Devices ROHS; Manufacturer: WILLSEMI; Manufacturer Part Number: ESD5311Z-2/TR; Item Type: Diode; Package: DFN0603-D; LCSC Part Number: C239819; ComponentLink1Description: LCSC; ComponentLink1URL: https://www.lcsc.com/product-detail/ESD-Protection-Devices_WILLSEMI-Will-Semicon-ESD5311Z-2-TR_C239819.html
footprint DFN0603-D
pins: 1 K, 2 A

## ESD5341N-2/TR
designator D?
4A@8/20us 15V 7V 5V Unidirectional DFN1006-2L TVS ROHS; Manufacturer: WILLSEMI; Manufacturer Part Number: ESD5341N-2/TR; Item Type: Diode; Package: DFN1006-2L; ComponentLink1Description: LCSC; ComponentLink1URL: https://www.lcsc.com/product-detail/TVS_WILLSEMI-Will-Semicon-ESD5341N-2-TR_C239773.html; LCSC Part Number: C239773
footprint DFN1006-2L_
pins: 1 K, 2 A

## ESD5344D-10/TR
designator D?
DFN2510-10L ESD Protection Devices ROHS; Manufacturer: WILLSEMI; Manufacturer Part Number: ESD5344D-10/TR; ComponentLink1Description: LCSC; ComponentLink1URL: https://www.lcsc.com/product-detail/span-style-background-color-ff0-ESD-span-Protection-Devices_WILLSEMI-Will-Semicon-ESD5344D-10-TR_C239666.html; Footprint: DFN2510-10L; LCSC Part Number: C239666
footprint DFN2510-10L_
pins: 1 I/O1, 2 I/O2, 3_8 GND, 4 I/O3, 5 I/O4, 6 NC, 7 NC, 9 NC, 10 NC

## ESD5451N
designator D?
DFN1006-2(0402) ESD Protection Devices ROHS; Manufacturer: TECH PUBLIC; Manufacturer Part Number: ESD5451N; Footprint: DFN1006-2(0402); ComponentLink1Description: LCSC; ComponentLink1URL: https://www.lcsc.com/product-detail/span-style-background-color-ff0-ESD-span-Protection-Devices_TECH-PUBLIC-ESD5451N_C2936977.html; LCSC Part Number: C2936977
footprint DFN1006-2L (Bi-Directional)
pins: 1 K, 2 K

## ESD5451N-2/TR
designator D?
IC USB FS SERIAL UART 28-SSOP; Manufacturer: WILLSEMI; Manufacturer Part Number: ESD5451N-2/TR; Number of Channels: 1; Max Supply Voltage: 5.25V; Min Supply Voltage: 3.3V; Data Rate: 12Mbps; Interface: UART,RS-232,RS-422,RS-485; Operating Supply Current: 15mA; Voltage: 5V; ComponentLink1Description: LCSC; ComponentLink1URL: https://www.lcsc.com/product-detail/TVS_Will-Semicon-ESD5451N-2-TR_C239604.html; Footprint: DFN1006-2L; LCSC Part Number: C239604; Supplier: Rs; Supplier Part Number: 406580P; RoHS: Yes; Category: Interface ICs; Stock: 59090; Pricing: 20=3.22, 100=3.05, 500=2.83, 1000=2.78 (GBP); Mounting Technology: Surface Mount; Case/Package: SSOP; Pins: 28; Weight: 0.080001oz; Min Operating Temperature: -40°C; Max Operating Temperature: 85°C; Packaging: Tape and Reel; Package Quantity: 1; Series: USBmadeEZ-UART; Number of Transceivers: 1; Length: 10.2mm; Width: 5.3mm; Height: 1.75mm; Radiation Hardening: No; Lead Free: Lead Free; RoHS Compliant: Yes; Reach SVHC Compliant: No; ComponentLink2URL: https://datasheet.ciiva.com/34304/2161019-34304054.pdf?src-supplier=Jameco; ComponentLink2Description: https://datasheet.ciiva.com/34304/2161019-34304054.pdf?src-supplier=Jameco; ComponentLink3URL: https://datasheet.ciiva.com/4787/ds-ft232r-11534-4787658.pdf?src-supplier=Mouser; ComponentLink3Description: https://datasheet.ciiva.com/4787/ds-ft232r-11534-4787658.pdf?src-supplier=Mouser; ComponentLink4URL: https://datasheet.ciiva.com/1787/ds-ft232r-1787048.pdf?src-supplier=Digikey; ComponentLink4Description: https://datasheet.ciiva.com/1787/ds-ft232r-1787048.pdf?src-supplier=Digikey; ComponentLink5URL: https://datasheet.ciiva.com/1787/ds-ft232r-1787047.pdf?src-supplier=Digikey; ComponentLink5Description: https://datasheet.ciiva.com/1787/ds-ft232r-1787047.pdf?src-supplier=Digikey; ComponentLink6URL: https://datasheet.ciiva.com/1787/ds-ft232r-1787049.pdf?src-supplier=Digikey; ComponentLink6Description: https://datasheet.ciiva.com/1787/ds-ft232r-1787049.pdf?src-supplier=Digikey
footprint DFN1006-2L_
pins: 1 K, 2 K

## ESD5471X
designator D?
DFN1006-2L ESD Protection Devices ROHS; Manufacturer: TECH PUBLIC; Manufacturer Part Number: ESD5471X; Item Type: ESD Diode; Package: DFN1006-2L; LCSC Part Number: C3011180; ComponentLink1Description: LCSC; ComponentLink1URL: https://www.lcsc.com/product-detail/span-style-background-color-ff0-ESD-span-Protection-Devices_TECH-PUBLIC-ESD5471X_C3011180.html
footprint DFN1006-2L_
pins: 1 A, 2 A

## ESD5651N-2/TR
designator D?
35A@8/20us 525W@8/20us 15V Bidirectional 4.5V DFN1006-2L ESD and Surge Protection (TVS/ESD) ROHS; Manufacturer: WILLSEMI(Will Semicon); Manufacturer Part Number: ESD5651N-2/TR; Item Type: Diode; Package: DFN1006; LCSC Part Number: C239784; ComponentLink1Description: LCSC; ComponentLink1URL: https://www.lcsc.com/product-detail/TVS_WILLSEMI-Will-Semicon-ESD5651N-2-TR_C239784.html
footprint DFN1006-2L (Bi-Directional)
pins: 1 K, 2 K

## ESD73011N-2/TR
designator D?
DFN1006 ESD Protection Devices ROHS; Manufacturer: WILLSEMI; Manufacturer Part Number: ESD73011N-2/TR; Item Type: ESD Diode; Package: DFN1006; LCSC Part Number: C506104; ComponentLink1Description: LCSC; ComponentLink1URL: https://www.lcsc.com/product-detail/span-style-background-color-ff0-ESD-span-Protection-Devices_WILLSEMI-Will-Semicon-ESD73011N-2-TR_C506104.html
footprint DFN1006-2L_
pins: 1 A, 2 A

## ESD73034D-10/TR
designator D?
DFN2510-10L ESD Protection Devices ROHS; Manufacturer: WILLSEMI; Manufacturer Part Number: ESD73034D-10/TR; Item Type: Diode; Package: DFN2510-10L; LCSC Part Number: C2941834; ComponentLink1Description: LCSC; ComponentLink1URL: https://www.lcsc.com/product-detail/span-style-background-color-ff0-ESD-span-Protection-Devices_WILLSEMI-Will-Semicon-ESD73034D-10-TR_C2941834.html
footprint DFN2510-10L_
pins: 1 I/O1, 2 I/O2, 3_8 GND, 4 I/O3, 5 I/O4, 6 NC, 7 NC, 9 NC, 10 NC

## ESDA6V1BC6
designator D?
TVS DIODE 5VWM SOT23-6; Manufacturer: STMicroelectronics; Manufacturer Part Number: ESDA6V1BC6; Item Type: TVS Diodes; Breakdown Voltage: 7.05V; Value: 20pF; Clamping Voltage: 11.35V; Direction: Bidirectional; ESD Protection: Yes; Leakage Current: 1µA; Max Breakdown Voltage: 8V; Max Junction Temperature (Tj): 150°C; Max Power Dissipation: 80W; Max Repetitive Reverse Voltage (Vrrm): 5V; Min Breakdown Voltage: 6.1V; Number of Bidirectional Channels: 4; Peak Pulse Current: 3A; Power Line Protection: No; Test Current: 1mA; Supplier: Arrow Electronics; LCSC Part Number: C495220; RoHS: Compliant; Stock: 15000; Pricing: 6000=0.0705, 9000=0.07 (USD); Case/Package: SOT-23; China RoHS: Compliant; Composition: Zener; Depth: 1.75mm; Height: 1.45mm; Lead Free: Lead Free; Length: 3.05mm; Lifecycle Status: Production; Max Operating Temperature: 150°C; Max Reverse Leakage Current: 1µA; Min Operating Temperature: -40°C; Mounting Technology: Surface Mount; Number of Channels: 4; Number of Elements: 4; Pins: 6; Number of Terminals: 6; Operating Supply Voltage: 5V; Peak Pulse Power: 80W; Peak Reverse Current: 1µA; Polarity: Bidirectional; Power Rating: 80W; Radiation Hardening: No; REACH SVHC: Yes; Reverse Breakdown Voltage: 6.1V; Reverse Standoff Voltage: 5V; Schedule B: 8536300000, 8536300000|8536300000|8536300000|8536300000|8536300000; Termination: SMD/SMT; Voltage Rating (DC): 6.1V; Width: 1.75mm; Working Voltage: 5V; ComponentLink1URL: https://datasheet.octopart.com:443/ESDA6V1BC6-STMicroelectronics-datasheet-62332559.pdf?src-supplier=TME; ComponentLink1Description: https://datasheet.octopart.com:443/ESDA6V1BC6-STMicroelectronics-datasheet-62332559.pdf?src-supplier=TME; ComponentLink2URL: https://datasheet.octopart.com:443/ESDA6V1BC6-STMicroelectronics-datasheet-23376.pdf?src-supplier=Components+Direct; ComponentLink2Description: https://datasheet.octopart.com:443/ESDA6V1BC6-STMicroelectronics-datasheet-23376.pdf?src-supplier=Components+Direct; ComponentLink3URL: https://datasheet.octopart.com:443/ESDA6V1BC6-STMicroelectronics-datasheet-158727008.pdf?src-supplier=Newchip+Electronics+Limited; ComponentLink3Description: https://datasheet.octopart.com:443/ESDA6V1BC6-STMicroelectronics-datasheet-158727008.pdf?src-supplier=Newchip+Electronics+Limited; ComponentLink4URL: https://datasheet.octopart.com:443/ESDA6V1BC6-STMicroelectronics-datasheet-14049101.pdf?src-supplier=iiiC; ComponentLink4Description: https://datasheet.octopart.com:443/ESDA6V1BC6-STMicroelectronics-datasheet-14049101.pdf?src-supplier=iiiC
footprint SOT-23-6
pins: 1 K, 2 K, 2 K, 3 K, 4 K, 5 K

## ESDA6V1W5
designator D?
TVS DIODE 3VWM SOT3235; Manufacturer: STMicroelectronics; Manufacturer Part Number: ESDA6V1W5; Direction: Unidirectional; Number of Elements: 4; Capacitance: 90pF; Reverse Breakdown Voltage: 6.1V; Operating Supply Voltage: 3V; Element Configuration: Common Anode; Breakdown Voltage: 7.2V; Peak Pulse Power: 150W; Power Line Protection: No; Leakage Current: 1uA; Test Current: 1mA; ESD Protection: Yes; Peak Pulse Current: 15A; Diode Type: ZENER; Supplier 1: Arrow Electronics; RoHS: Yes; Category: TVS Diodes; Stock 1: 3304; Pricing 1: 1=0.46690, 10=0.38770, 25=0.37260, 100=0.27930, 250=0.27650, 500=0.23480, 1000=0.21350, 3000=0.10000 (USD); Mount: Surface Mount; Case/Package: SOT-323; Number of Pins: 5; Min Operating Temperature: -40°C; Max Operating Temperature: 125°C; Packaging: Tape and Reel; Package Quantity: 1; Polarity: Unidirectional; Number of Channels: 4; Termination: SMD/SMT; Number of Unidirectional Channels: 4; Reverse Standoff Voltage: 3V; Min Breakdown Voltage: 6.1V; Working Voltage: 3V; Max Reverse Leakage Current: 1uA; Max Breakdown Voltage: 7.2V; Voltage Rating (DC): 6.1V; Resistor Type: Zener; Series: ESDA, TRANSIL™; Length: 2.2mm; Width: 1.35mm; Height: 1mm; Depth: 1.35mm; Radiation Hardening: No; Reach SVHC Compliant: Yes; Lead Free: Lead Free; RoHS Compliant: Yes; ComponentLink1URL: https://datasheet.ciiva.com/15143/getdatasheetpartid-134557-15143650.pdf?src-supplier=Verical; ComponentLink1Description: https://datasheet.ciiva.com/15143/getdatasheetpartid-134557-15143650.pdf?src-supplier=Verical; ComponentLink2URL: https://datasheet.ciiva.com/1276/1671027-1276908.pdf?src-supplier=Element14; ComponentLink2Description: https://datasheet.ciiva.com/1276/1671027-1276908.pdf?src-supplier=Element14; ComponentLink3URL: https://datasheet.ciiva.com/22695/1671027-22695673.pdf?src-supplier=Element14; ComponentLink3Description: https://datasheet.ciiva.com/22695/1671027-22695673.pdf?src-supplier=Element14; ComponentLink4URL: https://datasheet.ciiva.com/338/cd00064033-338380.pdf?src-supplier=Digi-Key; ComponentLink4Description: https://datasheet.ciiva.com/338/cd00064033-338380.pdf?src-supplier=Digi-Key; ComponentLink5URL: https://datasheet.ciiva.com/338/cd00064033-338379.pdf?src-supplier=Digi-Key; ComponentLink5Description: https://datasheet.ciiva.com/338/cd00064033-338379.pdf?src-supplier=Digi-Key; ComponentLink6URL: https://datasheet.ciiva.com/338/cd00064033-338381.pdf?src-supplier=Digi-Key; ComponentLink6Description: https://datasheet.ciiva.com/338/cd00064033-338381.pdf?src-supplier=Digi-Key; ComponentLink7URL: https://datasheet.ciiva.com/41443/001184222-da-01-en-transil-array-da-esda6v1w5-sot-323-5-stm-41443642.pdf?src-supplier=Conrad; ComponentLink7Description: https://datasheet.ciiva.com/41443/001184222-da-01-en-transil-array-da-esda6v1w5-sot-323-5-stm-41443642.pdf?src-supplier=Conrad; Supplier Part Number 1: ESDA6V1W5; LCSC Part Number: C48677; Item Type: Diode
footprint SOT-323-5
pins: 1 K, 2 K, 3 K, 4 K, 5 K

## ESDA6V8AV6
designator D?
4A 14V 40W 6V Unidirectional 5V SOT-563 ESD and Surge Protection (TVS/ESD) ROHS; Manufacturer: TECH PUBLIC; Manufacturer Part Number: ESDA6V8AV6; Package: SOT-563; LCSC Part Number: C3021131; Item Type: (TVS/ESD); ComponentLink1Description: LCSC; ComponentLink1URL: https://www.lcsc.com/product-detail/ESD-and-Surge-Protection-TVS-ESD_TECH-PUBLIC-ESDA6V8AV6_C3021131.html?s_z=n_ESDA6V8AV6
footprint SOT-563
pins: 1 K, 2 A, 3 K, 4 K, 5 K, 6 K

## ESDA7P60-1U1M
designator D?
TVS DIODE 5VWM 11.6VC 1610; Manufacturer: STMicroelectronics; Manufacturer Part Number: ESDA7P60-1U1M; Item Type: TVS Diodes; Number of Unidirectional Channels: 1; Reverse Standoff Voltage: 5V; Min Breakdown Voltage: 6.4V; Peak Pulse Power: 700W; Power Line Protection: No; Polarity: Unidirectional; Max Breakdown Voltage: 7.2V; Peak Pulse Current: 60A; Diode Type: ZENER; Supplier: Mouser; LCSC Part Number: C1975146; RoHS: Yes; Stock: 24694; Pricing: 1=0.37, 10=0.245, 50=0.245, 100=0.166, 1000=0.097, 10000=0.077 (USD); Mounting Technology: Surface Mount; Case/Package: 0603; Pins: 2; Case Code (Imperial): 0603; Case Code (Metric): 1610; Min Operating Temperature: -55°C; Max Operating Temperature: 150°C; Packaging: Cut Tape; Series: ESDA; Reach SVHC Compliant: No; RoHS Compliant: Yes; ComponentLink1URL: http://www.farnell.com/datasheets/2041290.pdf?src-supplier=Farnell; ComponentLink1Description: http://www.farnell.com/datasheets/2041290.pdf?src-supplier=Farnell; ComponentLink2URL: http://www.farnell.com/datasheets/2041290.pdf?src-supplier=Element14; ComponentLink2Description: http://www.farnell.com/datasheets/2041290.pdf?src-supplier=Element14; ComponentLink3URL: http://www.st.com/content/ccc/resource/technical/document/datasheet/44/e9/26/44/42/ee/4f/e5/DM00139972.pdf/files/DM00139972.pdf/jcr:content/translations/en.DM00139972.pdf?src-supplier=Digikey; ComponentLink3Description: http://www.st.com/content/ccc/resource/technical/document/datasheet/44/e9/26/44/42/ee/4f/e5/DM00139972.pdf/files/DM00139972.pdf/jcr:content/translations/en.DM00139972.pdf?src-supplier=Digikey
footprint Diode 1610
pins: 1 K, 2 A